# EAGLE library part 615008160021 (library 615008160021)
WR-MJ_8P8C_THT_Horizontal ModularJacks_8P8C_THT_Horizontal_Plastic_Tab Up_ Cat6 Source: Datasheet <https://www.we-online.com/catalog/datasheet/615008160021.pdf>
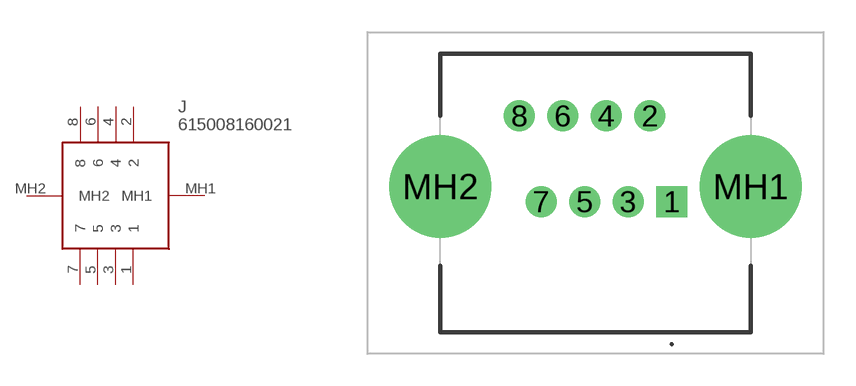
[diagram p0: symbol with the pads of 615008160021; footprint 615008160021]

Designator prefix J

## 615008160021 (Description: WR-MJ_8P8C_THT_Horizontal ModularJacks_8P8C_THT_Horizontal_Plastic_Tab Up_ Cat6; Height: 14.63mm; Manufacturer_Name: Wurth Elektronik; Manufacturer_Part_Number: 615008160021; Mouser_Part_Number: 710-615008160021; Mouser_Price-Stock: https://www.mouser.co.uk/ProductDetail/Wurth-Elektronik/615008160021?qs=OlC7AqGiEDnv55QyQjNbug%3D%3D)  [615008160021]
1  1
2  2
3  3
4  4
5  5
6  6
7  7
8  8
MH1  MH1
MH2  MH2

## Footprint 615008160021 (pad centres in mm)
615008160021-2
drill 0.89 pad 1.446 square: 1 0,0
drill 0.89 pad 1.446: 2 -1.016,4; 3 -2.032,0; 4 -3.048,4; 5 -4.064,0; 6 -5.08,4; 7 -6.096,0; 8 -7.11,4
drill 3.18 pad 4.77: MH1 3.685,0.7; MH2 -10.795,0.7